# Altium footprint library SYNCBOX_V3I1.PcbLib: 251 footprints (part 14 of 16)
Each footprint in its own frame and in the unit in brackets; x right, y up, seen from the top. Pads: shape width x height; smd on the part's side, far side on the other; paste and mask are expansions set on the pad; w line width, h text height; cw(c..) or ccw(c..) is an arc to the next point about the centre after c.
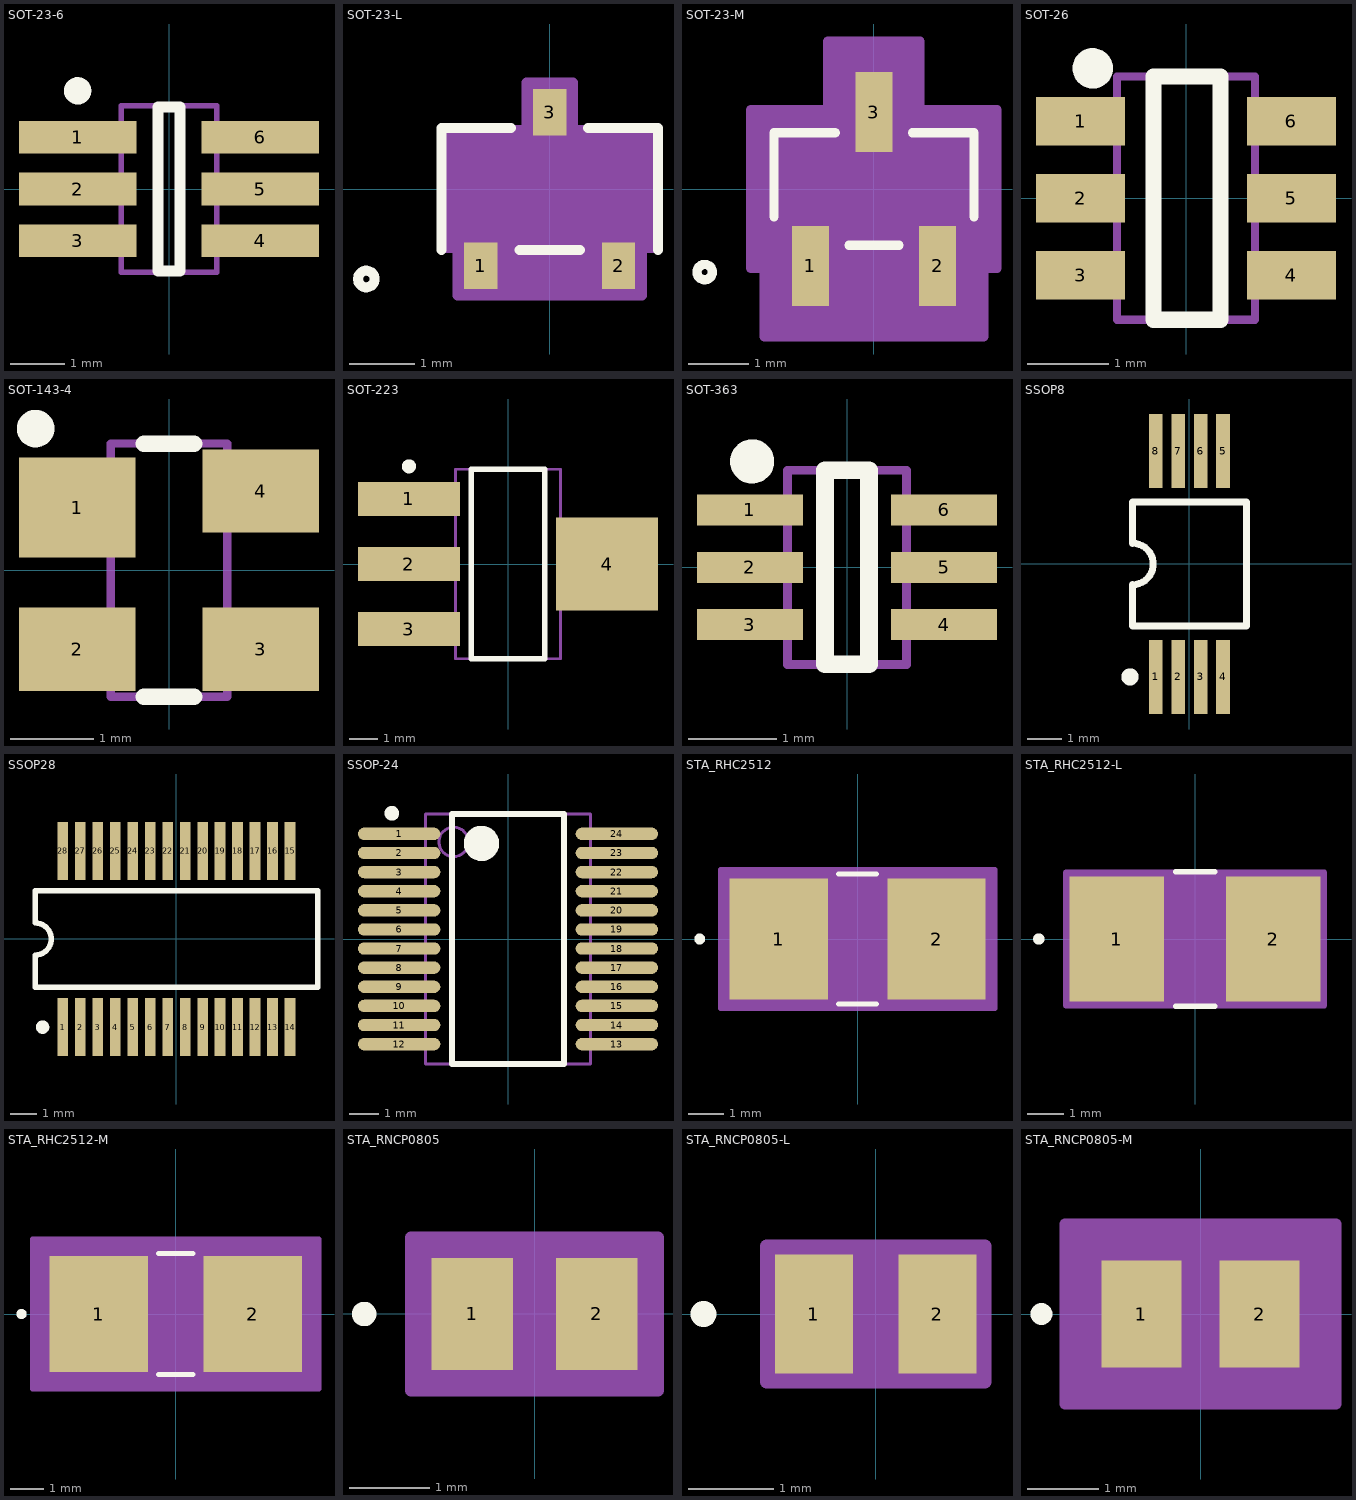
[diagram p13: the footprints below, top view; thin cyan lines are the x and y axes]

## SOT-23-6 [mm]
height 1.45
pads (6):
  rect 2.15x0.6 smd: 1(-1.675,0.95) 2(-1.675,0) 3(-1.675,-0.95) 4(1.675,-0.95) 5(1.675,0) 6(1.675,0.95)
Top Overlay:
  circle w0.25: c-1.675,1.8 r0.125
  lines w0.2: -0.2,-1.5 -0.2,1.5 0.2,1.5 0.2,-1.5 -0.2,-1.5
Mechanical 13:
  lines w0.1: -0.875,-1.525 0.875,-1.525 0.875,1.525 -0.875,1.525 -0.875,-1.525
3D body: height 1.45, standoff 0, extent -0.875,-1.525 0.875,1.525

## SOT-23-L [mil]
pads (3):
  rect 20x28 smd paste+0 mask+0: 1(-41.34,-46) 2(41.34,-46) 3(0,46)
Top Overlay:
  circle w6: c-110,-54 r5
  lines w6: -65,-36.5 -65,36.5 -23.1,36.5 ; -18.24,-36.5 18.24,-36.5 ; 23.1,36.5 65,36.5 65,-36.5
Mechanical 13:
  circle w0: c-50,-21.5 r5
  lines w1: -60,-31.5 -60,31.5 60,31.5 60,-31.5 -60,-31.5 ; -51.34,-54 -31.34,-54 -31.34,-31.5 -51.34,-31.5 -51.34,-54 ; -10,31.5 -10,54 10,54 10,31.5 -10,31.5 ; 31.34,-54 51.34,-54 51.34,-31.5 31.34,-31.5 31.34,-54
Mechanical 15:
  region: 60,-31.5 -60,-31.5 -60,31.5 60,31.5
  region: -64,-35.5 -64,35.5 -14,35.5 -14,64 14,64 14,35.5 64,35.5 64,-35.5 55.34,-35.5 55.34,-64 -55.34,-64 -55.34,-35.5
  lines w6: -64,-35.5 -55.34,-35.5 -55.34,-64 55.34,-64 55.34,-35.5 64,-35.5 64,35.5 14,35.5 14,64 -14,64 -14,35.5 -64,35.5 -64,-35.5
3D body: height 10, standoff 0, extent 0,0 10,10
3D body "SOT-23_J.stp": height 39.53, standoff -0.83, extent -58.07,-48.91 58.07,48.91

## SOT-23-M [mil]
pads (3):
  rect 24x52 smd paste+0 mask+0: 1(-41.34,-50) 2(41.34,-50) 3(0,50)
Top Overlay:
  circle w6: c-110,-54 r5
  lines w6: -65,-18.03 -65,36.5 -25.1,36.5 ; -16.24,-36.5 16.24,-36.5 ; 25.1,36.5 65,36.5 65,-18.03
Mechanical 13:
  circle w0: c-50,-21.5 r5
  lines w1: -60,-31.5 -60,31.5 60,31.5 60,-31.5 -60,-31.5 ; -51.34,-54 -31.34,-54 -31.34,-31.5 -51.34,-31.5 -51.34,-54 ; -10,31.5 -10,54 10,54 10,31.5 -10,31.5 ; 31.34,-54 51.34,-54 51.34,-31.5 31.34,-31.5 31.34,-54
Mechanical 15:
  region: 60,-31.5 -60,-31.5 -60,31.5 60,31.5
  region: -80,-51.5 -80,51.5 -30,51.5 -30,96 30,96 30,51.5 80,51.5 80,-51.5 71.34,-51.5 71.34,-96 -71.34,-96 -71.34,-51.5
  lines w6: -80,-51.5 -71.34,-51.5 -71.34,-96 71.34,-96 71.34,-51.5 80,-51.5 80,51.5 30,51.5 30,96 -30,96 -30,51.5 -80,51.5 -80,-51.5
3D body: height 10, standoff 0, extent 0,0 10,10
3D body "SOT-23_J.stp": height 39.53, standoff -0.83, extent -58.07,-43.91 58.07,53.91

## SOT-26 [mm] "6-Leads, 1.6MM BODY, Pitch 0,95mm, IPC Medium Density"
height 1.35
pads (6):
  rect 1.1x0.6 smd: 1(-1.3,0.95) 2(-1.3,0) 3(-1.3,-0.95) 4(1.3,-0.95) 5(1.3,0) 6(1.3,0.95)
Top Overlay:
  circle w0.25: c-1.15,1.6 r0.125
  lines w0.2: -0.4,-1.5 0.425,-1.5 0.425,1.5 -0.4,1.5 -0.4,-1.5
Mechanical 13:
  lines w0.1: -0.85,-1.5 -0.85,1.5 0.85,1.5 0.85,-1.5 -0.85,-1.5
3D body: height 1.35, standoff 0.05, extent -0.85,-1.5 0.85,1.5

## SOT-143-4 [mm] "SOT143, 4-Leads, Body 3,0x2,6mm (max), Pitch 1,92mm"
height 1.1
pads (4):
  rect 1.4x1.2 smd: 1(-1.1,0.75)
  rect 1.4x1 smd: 2(-1.1,-0.95) 3(1.1,-0.95) 4(1.1,0.95)
Top Overlay:
  circle w0.25: c-1.6,1.7 r0.1
  lines w0.2: -0.3,-1.52 0.3,-1.52 ; -0.3,1.52 0.3,1.52
Mechanical 13:
  lines w0.1: -0.7,-1.52 -0.7,1.52 0.7,1.52 0.7,-1.52 -0.7,-1.52
3D body: height 1.22, standoff 0.05, extent -0.7,-1.52 0.7,1.52

## SOT-223 [mm] "SOT223, 4-Leads, Body 6.7x7.3mm (max), Pitch 2.30mm, IPC Low Density"
height 1.8
pads (4):
  rect 3.6x1.2 smd: 1(-3.5,2.3) 2(-3.5,0) 3(-3.5,-2.3)
  rect 3.6x3.3 smd: 4(3.5,0)
Top Overlay:
  circle w0.25: c-3.5,3.45 r0.125
  lines w0.2: -1.3,-3.35 1.3,-3.35 1.3,3.35 -1.3,3.35 -1.3,-3.35
Mechanical 13:
  lines w0.1: -1.85,-3.35 1.85,-3.35 1.85,3.35 -1.85,3.35 -1.85,-3.35
3D body: height 1.8, standoff 0.02, extent -1.85,-3.35 1.85,3.35

## SOT-363 [mm] "6 leads, 1.25mm body, 0.65mm pitch"
height 1.1
pads (6):
  rect 1.2x0.35 smd: 1(-1.1,0.65) 2(-1.1,0) 3(-1.1,-0.65) 4(1.1,-0.65) 5(1.1,0) 6(1.1,0.65)
Top Overlay:
  circle w0.25: c-1.075,1.2 r0.125
  lines w0.2: -0.25,-1.1 0.25,-1.1 0.25,1.1 -0.25,1.1 -0.25,-1.1
Mechanical 13:
  lines w0.1: -0.675,-1.1 -0.675,1.1 0.675,1.1 0.675,-1.1 -0.675,-1.1
3D body: height 1.1, standoff 0.05, extent -0.675,-1.1 0.675,1.1

## SSOP8 [mm] "SSOP, Plastic; 8 Leads; Body Width 5.3 mm; Pitch 0.65 mm"
height 2
pads (8):
  rect 0.4x2.15 smd: 1(-0.975,-3.275) 2(-0.325,-3.275) 3(0.325,-3.275) 4(0.975,-3.275) 5(0.975,3.275) 6(0.325,3.275) 7(-0.325,3.275) 8(-0.975,3.275)
Top Overlay:
  circle w0.25: c-1.725,-3.275 r0.125
  lines w0.2: -1.65,-1.8 1.65,-1.8 1.65,1.8 -1.65,1.8 -1.65,0.6 cw(c-1.65,0) -1.65,-0.6 -1.65,-1.8

## SSOP28 [mm] "SSOP, Plastic; 28 Leads; Body Width 5.3 mm; Pitch 0.65 mm"
height 2
pads (28):
  rect 0.4x2.15 smd: 1(-4.225,-3.275) 2(-3.575,-3.275) 3(-2.925,-3.275) 4(-2.275,-3.275) 5(-1.625,-3.275) 6(-0.975,-3.275) 7(-0.325,-3.275) 8(0.325,-3.275) 9(0.975,-3.275) 10(1.625,-3.275) 11(2.275,-3.275) 12(2.925,-3.275) 13(3.575,-3.275) 14(4.225,-3.275) 15(4.225,3.275) 16(3.575,3.275) 17(2.925,3.275) 18(2.275,3.275) 19(1.625,3.275) 20(0.975,3.275) 21(0.325,3.275) 22(-0.325,3.275) 23(-0.975,3.275) 24(-1.625,3.275) 25(-2.275,3.275) 26(-2.925,3.275) 27(-3.575,3.275) 28(-4.225,3.275)
Top Overlay:
  circle w0.25: c-4.975,-3.275 r0.125
  lines w0.2: -5.25,-1.8 -5.25,-0.6 ccw(c-5.25,0) -5.25,0.6 -5.25,1.8 5.25,1.8 5.25,-1.8 -5.25,-1.8

## SSOP-24 [mm]
height 2
pads (24):
  oval 2.8x0.42 smd mask+0.08: 1(-3.7,3.575) 2(-3.7,2.925) 3(-3.7,2.275) 4(-3.7,1.625) 5(-3.7,0.975) 6(-3.7,0.325) 7(-3.7,-0.325) 8(-3.7,-0.975) 9(-3.7,-1.625) 10(-3.7,-2.275) 11(-3.7,-2.925) 12(-3.7,-3.575) 13(3.7,-3.575) 14(3.7,-2.925) 15(3.7,-2.275) 16(3.7,-1.625) 17(3.7,-0.975) 18(3.7,-0.325) 19(3.7,0.325) 20(3.7,0.975) 21(3.7,1.625) 22(3.7,2.275) 23(3.7,2.925) 24(3.7,3.575)
Top Overlay:
  circle w0.6: c-0.9,3.25 r0.3
  circle w0.25: c-3.95,4.275 r0.125
  lines w0.2: -1.9,-4.25 1.9,-4.25 1.9,4.25 -1.9,4.25 -1.9,-4.25
Mechanical 13:
  circle w0.1: c-1.85,3.3 r0.5
  lines w0.1: -2.8,-4.25 2.8,-4.25 2.8,4.25 -2.8,4.25 -2.8,-4.25
3D body: height 2, standoff 0.05, extent -2.8,-4.25 2.8,4.25

## STA_RHC2512 [mil]
pads (2):
  rect 109x134 smd paste+0 mask+0: 1(-87.5,0) 2(87.5,0)
Top Overlay:
  circle w6: c-175,0 r3
  lines w6: -20.89,-72 20.89,-72 ; -20.89,72 20.89,72
Mechanical 13:
  circle w0: c-82.5,0 r3
  lines w1: -128,-67 -128,67 ; -128,-67 -33,-67 -33,67 -128,67 ; -128,-67 128,-67 ; -128,-67 -128,67 ; -128,67 128,67 ; 128,-67 33,-67 33,67 128,67 ; 128,-67 128,67 ; 128,-67 128,67
Mechanical 15:
  region: 152,-77 -152,-77 -152,77 152,77
  lines w6: -152,-77 -152,77 152,77 152,-77 -152,-77
3D body: height 10, standoff 0, extent 0,0 10,10
3D body "STA_RHC2512.stp": height 27.99, standoff 0, extent -127.99,-67 128,67.01

## STA_RHC2512-L [mil]
pads (2):
  rect 101x134 smd paste+0 mask+0: 1(-83.5,0) 2(83.5,0)
Top Overlay:
  circle w6: c-167,0 r3
  lines w6: -20.89,-72 20.89,-72 ; -20.89,72 20.89,72
Mechanical 13:
  circle w0: c-78.5,0 r3
  lines w1: -128,-67 -128,67 ; -128,-67 128,-67 ; -128,-67 -33,-67 -33,67 -128,67 ; -128,-67 -128,67 ; -128,67 128,67 ; 128,-67 128,67 ; 128,-67 128,67 ; 128,-67 33,-67 33,67 128,67
Mechanical 15:
  region: 138,-71 -138,-71 -138,71 138,71
  lines w6: -138,-71 138,-71 138,71 -138,71 -138,-71
3D body "STA_RHC2512-L.stp": height 27.99, standoff 0, extent -127.99,-67 128,67.01
3D body: height 10, standoff 0, extent 0,0 10,10

## STA_RHC2512-M [mil]
pads (2):
  rect 117x138 smd paste+0 mask+0: 1(-91.5,0) 2(91.5,0)
Top Overlay:
  circle w6: c-183,0 r3
  lines w6: -20.25,-72 20.25,-72 ; -20.25,72 20.25,72
Mechanical 13:
  circle w0: c-86.5,0 r3
  lines w1: -128,-67 -128,67 ; -128,-67 -33,-67 -33,67 -128,67 ; -128,-67 128,-67 ; -128,-67 -128,67 ; -128,67 128,67 ; 128,-67 33,-67 33,67 128,67 ; 128,-67 128,67 ; 128,-67 128,67
Mechanical 15:
  region: 170,-89 -170,-89 -170,89 170,89
  lines w6: -170,-89 -170,89 170,89 170,-89 -170,-89
3D body: height 10, standoff 0, extent 0,0 10,10
3D body "STA_RHC2512-M.stp": height 27.99, standoff 0, extent -127.99,-67 128,67.01

## STA_RNCP0805 [mil]
pads (2):
  rect 40x55 smd paste+0 mask+0: 1(-30.5,0) 2(30.5,0)
Top Overlay:
  circle w6: c-83.5,0 r3
Mechanical 13:
  circle w0: c-25.5,0 r3
  lines w1: -42.5,-27.5 -42.5,27.5 ; -42.5,-27.5 -10.5,-27.5 -10.5,27.5 -42.5,27.5 ; -42.5,-27.5 42.5,-27.5 ; -42.5,-27.5 -42.5,27.5 ; -42.5,27.5 42.5,27.5 ; 42.5,-27.5 10.5,-27.5 10.5,27.5 42.5,27.5 ; 42.5,-27.5 42.5,27.5 ; 42.5,-27.5 42.5,27.5
Mechanical 15:
  region: 60.5,-37.5 -60.5,-37.5 -60.5,37.5 60.5,37.5
  lines w6: -60.5,-37.5 -60.5,37.5 60.5,37.5 60.5,-37.5 -60.5,-37.5
3D body: height 10, standoff 0, extent 0,0 10,10
3D body "STA_RNCP0805.stp": height 24.02, standoff 0, extent -42.52,-27.48 42.52,27.48

## STA_RNCP0805-L [mil]
pads (2):
  rect 36x55 smd paste+0 mask+0: 1(-28.5,0) 2(28.5,0)
Top Overlay:
  circle w6: c-79.5,0 r3
Mechanical 13:
  circle w0: c-23.5,0 r3
  lines w1: -42.5,-27.5 -42.5,27.5 ; -42.5,-27.5 -10.5,-27.5 -10.5,27.5 -42.5,27.5 ; -42.5,-27.5 42.5,-27.5 ; -42.5,-27.5 -42.5,27.5 ; -42.5,27.5 42.5,27.5 ; 42.5,-27.5 10.5,-27.5 10.5,27.5 42.5,27.5 ; 42.5,-27.5 42.5,27.5 ; 42.5,-27.5 42.5,27.5
Mechanical 15:
  region: 50.5,-31.5 -50.5,-31.5 -50.5,31.5 50.5,31.5
  lines w6: -50.5,-31.5 -50.5,31.5 50.5,31.5 50.5,-31.5 -50.5,-31.5
3D body: height 10, standoff 0, extent 0,0 10,10
3D body "STA_RNCP0805-L.stp": height 24.02, standoff 0, extent -42.52,-27.48 42.52,27.48

## STA_RNCP0805-M [mil]
pads (2):
  rect 44x59 smd paste+0 mask+0: 1(-32.5,0) 2(32.5,0)
Top Overlay:
  circle w6: c-87.5,0 r3
Mechanical 13:
  circle w0: c-27.5,0 r3
  lines w1: -42.5,-27.5 -42.5,27.5 ; -42.5,-27.5 -10.5,-27.5 -10.5,27.5 -42.5,27.5 ; -42.5,-27.5 42.5,-27.5 ; -42.5,-27.5 -42.5,27.5 ; -42.5,27.5 42.5,27.5 ; 42.5,-27.5 10.5,-27.5 10.5,27.5 42.5,27.5 ; 42.5,-27.5 42.5,27.5 ; 42.5,-27.5 42.5,27.5
Mechanical 15:
  region: 74.5,-49.5 -74.5,-49.5 -74.5,49.5 74.5,49.5
  lines w6: -74.5,-49.5 -74.5,49.5 74.5,49.5 74.5,-49.5 -74.5,-49.5
3D body: height 10, standoff 0, extent 0,0 10,10
3D body "STA_RNCP0805-M.stp": height 24.02, standoff 0, extent -42.52,-27.48 42.52,27.48